# Altium footprint library HANXIA_HX PZ1.27-2x8P TP.PcbLib: 1 footprints
Each footprint in its own frame and in the unit in brackets; x right, y up, seen from the top. Pads: shape width x height; smd on the part's side, far side on the other; paste and mask are expansions set on the pad; w line width, h text height; cw(c..) or ccw(c..) is an arc to the next point about the centre after c.
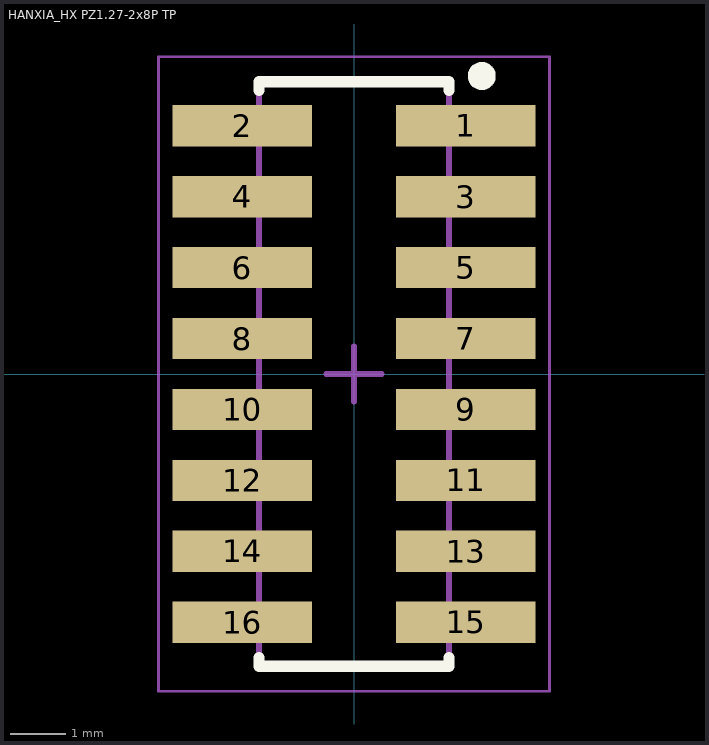
[diagram p0: the footprint, top view; thin cyan lines are the x and y axes]

## HANXIA_HX PZ1.27-2x8P TP [mm]
height 5.9
pads (16):
  rect 2.5x0.74 smd: 1(2,4.445) 2(-2,4.445) 3(2,3.175) 4(-2,3.175) 5(2,1.905) 6(-2,1.905) 7(2,0.635) 8(-2,0.635) 9(2,-0.635) 10(-2,-0.635) 11(2,-1.905) 12(-2,-1.905) 13(2,-3.175) 14(-2,-3.175) 15(2,-4.445) 16(-2,-4.445)
Top Overlay:
  circle w0.25: c2.286,5.334 r0.125
  lines w0.2: -1.7,-5.08 -1.7,-5.23 1.7,-5.23 1.7,-5.08 ; -1.7,5.08 -1.7,5.23 1.7,5.23 1.7,5.08
Mechanical 13:
  lines w0.1: -1.7,-5.23 1.7,-5.23 1.7,5.23 -1.7,5.23 -1.7,-5.23
Mechanical 15:
  lines w0.05: -3.5,-5.68 3.5,-5.68 3.5,5.68 -3.5,5.68 -3.5,-5.68
  lines w0.1: -0.5,0 0.5,0 ; 0,-0.5 0,0.5
3D body "HANXIA_HX PZ1.27-2x8P TP.STEP": height 4.69, standoff 0.01, extent -2.75,-5.09 2.75,5.07